# EAGLE library part CONN_22 (library Sirokko)
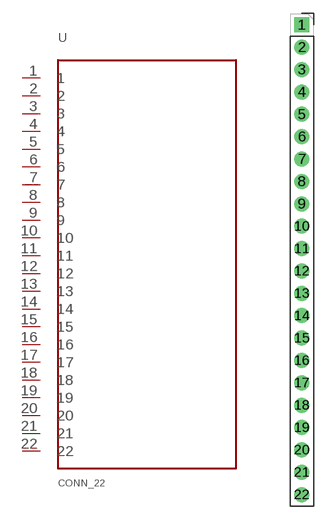
[diagram p0: symbol with the pads of SOCKET_1X22_P2.54; footprint SOCKET_1X22_P2.54]

Designator prefix -

## CONN_22  [SOCKET_1X22_P2.54]
1  1  pas
2  2  pas
3  3  pas
4  4  pas
5  5  pas
6  6  pas
7  7  pas
8  8  pas
9  9  pas
10  10  pas
11  11  pas
12  12  pas
13  13  pas
14  14  pas
15  15  pas
16  16  pas
17  17  pas
18  18  pas
19  19  pas
20  20  pas
21  21  pas
22  22  pas

## Footprint SOCKET_1X22_P2.54 (pad centres in mm)
Through hole straight socket strip, 1x22, 2.54mm pitch, single row (from Kicad 4.0.7), script generated
drill 1 pad 1.7 square: 1 0,0
drill 1 pad 1.7: 2 0,-2.54; 3 0,-5.08; 4 0,-7.62; 5 0,-10.16; 6 0,-12.7; 7 0,-15.24; 8 0,-17.78; 9 0,-20.32; 10 0,-22.86; 11 0,-25.4; 12 0,-27.94; 13 0,-30.48; 14 0,-33.02; 15 0,-35.56; 16 0,-38.1; 17 0,-40.64; 18 0,-43.18; 19 0,-45.72; 20 0,-48.26; 21 0,-50.8; 22 0,-53.34